# Altium footprint library ESP8266.PcbLib: 13 footprints
Each footprint in its own frame and in the unit in brackets; x right, y up, seen from the top. Pads: shape width x height; smd on the part's side, far side on the other; paste and mask are expansions set on the pad; w line width, h text height; cw(c..) or ccw(c..) is an arc to the next point about the centre after c.
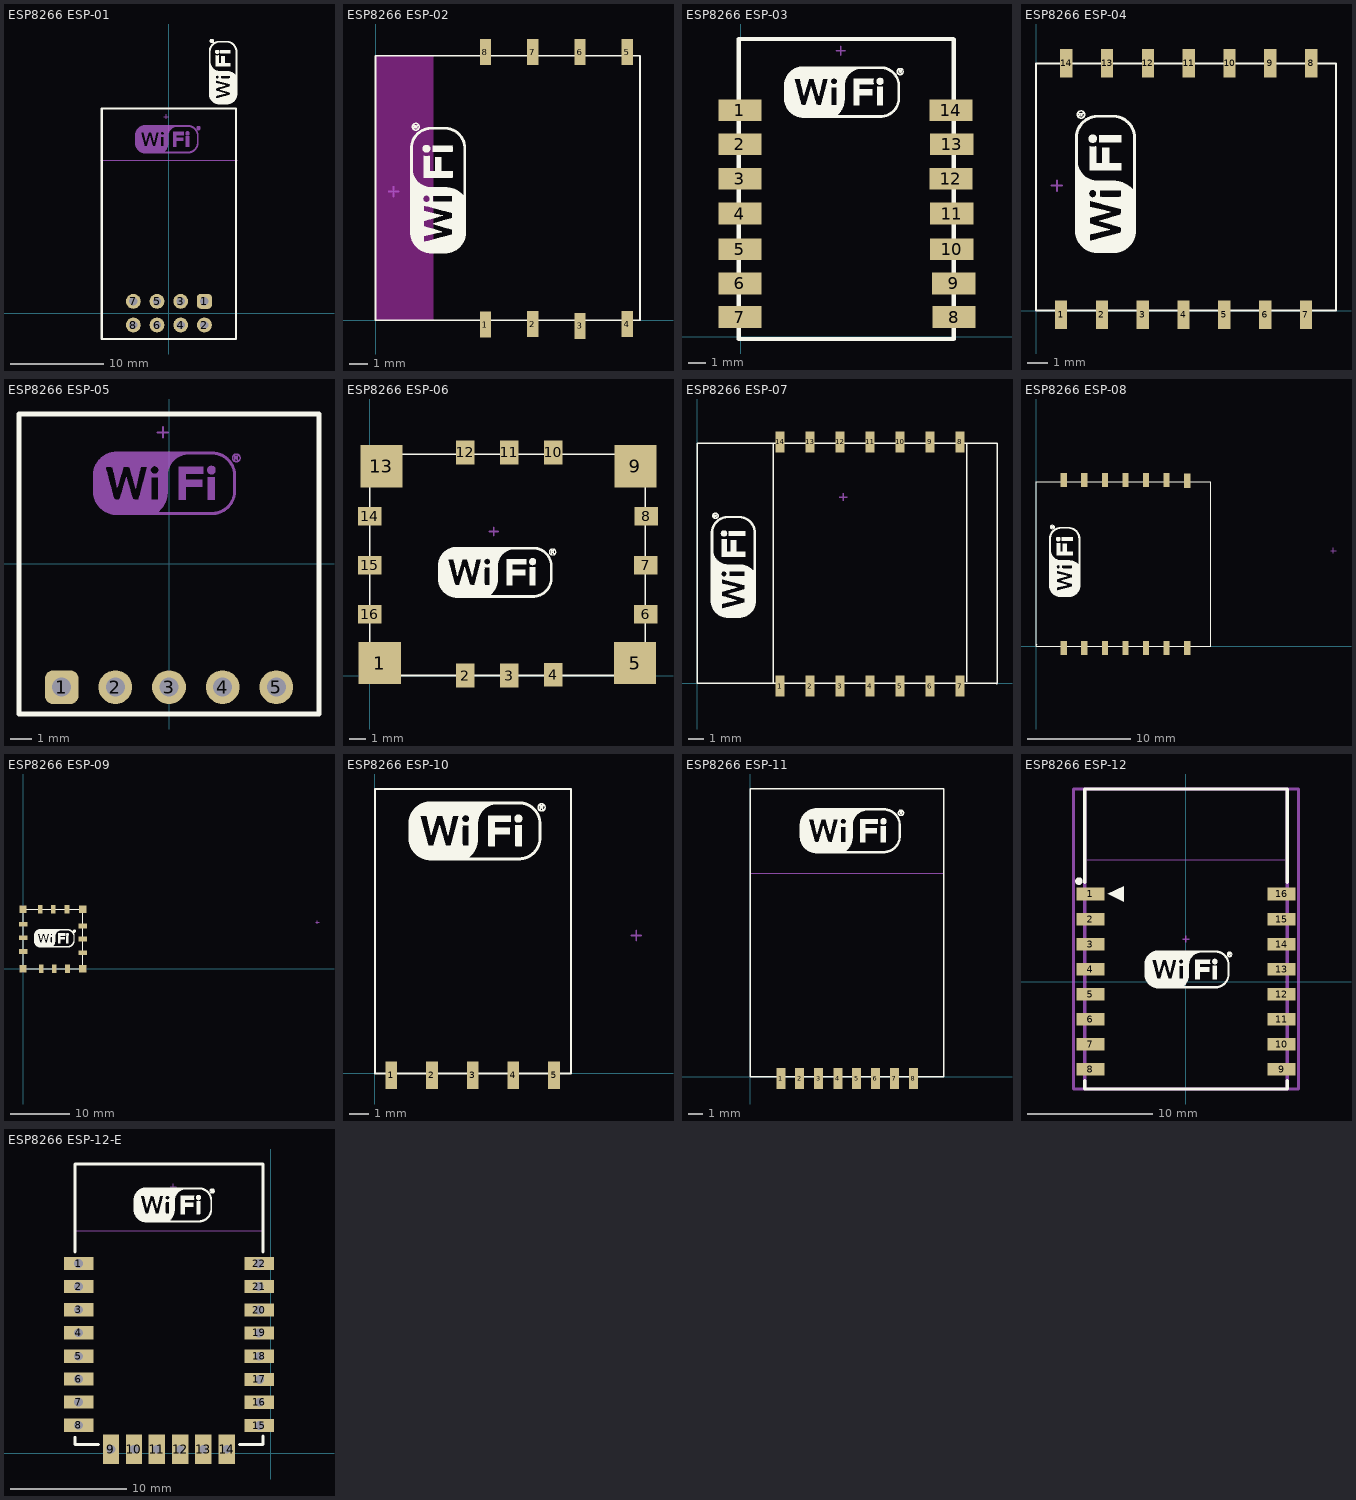
[diagram p0: the footprints below, top view; thin cyan lines are the x and y axes]

## ESP8266 ESP-01 [mm] "ESP8266 ESP-01"
pads (8):
  rrect50% 1.6x1.6 hole 0.9: 1(3.81,1.27)
  round 1.6 hole 0.9: 2(3.81,-1.27) 3(1.27,1.27) 4(1.27,-1.27) 5(-1.27,1.27) 6(-1.27,-1.27) 7(-3.81,1.27) 8(-3.81,-1.27)
Top Overlay:
  drawing of 1264 lines, arcs and shapes, not listed
Mechanical 1:
  drawing of 1260 lines, arcs and shapes, not listed
Mechanical 13:
  lines w0.051: -7.289,16.395 7.315,16.395
  text "CUTOUT POLYGON" at -7.035,21.034 h0.25
  text "ANTENNA AREA" at -7.035,21.542 h0.25
Mechanical 15:
  lines w0.1: -0.559,21.067 -0.051,21.067 ; -0.305,20.813 -0.305,21.321
3D body "zl262-8d_p2-54_l10-66_w5_h8-5.step": height 8.5, standoff -3, extent -5.33,-2.5 5.33,2.5
3D body "User Library-Wi07C.STEP": height -1.2, standoff -12.88, extent -7.275,-2.781 7.225,22.019

## ESP8266 ESP-02 [mm] "ESP8266 ESP-02"
pads (8):
  rect 0.6x1.4 smd: 1(5.893,-0.229) 2(8.433,-0.203) 3(10.973,-0.305) 4(13.513,-0.203) 5(13.513,14.402) 6(10.973,14.402) 7(8.433,14.402) 8(5.893,14.402)
Top Layer keep-out:
  region: 0,14.2 0.027,14.173 3.099,14.173 3.099,0.025 3.073,0 0,0
Top Overlay:
  drawing of 1264 lines, arcs and shapes, not listed
  text ".Designator" at 0,-0.965 h1
Mechanical 15:
  lines w0.1: 0.713,6.909 1.221,6.909 ; 0.967,6.655 0.967,7.163
3D body: height 0.5, standoff 0, extent 0,0 14.199,14.199
3D body: height 1, standoff 0.5, extent 4.826,3.454 9.144,7.95
3D body: height 1, standoff 0.5, extent 10.63,4.635 13.094,6.896

## ESP8266 ESP-03 [mil] "ESP8266 ESP-03"
pads (14):
  rect 100x50 smd: 1(-2,522) 2(-2,443.27) 3(-2,364) 4(-2,284) 5(-2,202) 6(-2,123) 7(-2,45.57) 8(491,45.57) 9(490,123) 10(486,202) 11(486,284) 12(484,364) 13(486,443.27) 14(484,522)
Top Overlay:
  drawing of 1265 lines, arcs and shapes, not listed
  text ".Designator" at -6,-48 h39.37
Mechanical 15:
  lines w3.94: 220,658.92 240,658.92 ; 230,648.92 230,668.92
3D body "User Library-ESP-03.STEP": height 134.34, standoff -1.09, extent -0.97,1 483.28,682.1

## ESP8266 ESP-04 [mm] "ESP8266 ESP-04"
pads (14):
  rect 0.6x1.4 smd: 1(1.229,-0.203) 2(3.229,-0.203) 3(5.229,-0.203) 4(7.229,-0.203) 5(9.229,-0.203) 6(11.229,-0.203) 7(13.229,-0.203) 8(13.483,12.116) 9(11.483,12.116) 10(9.483,12.116) 11(7.483,12.116) 12(5.483,12.116) 13(3.483,12.116) 14(1.483,12.116)
Top Overlay:
  drawing of 1264 lines, arcs and shapes, not listed
  text ".Designator" at -0.076,-1.956 h1
Mechanical 15:
  lines w0.1: 0.764,6.121 1.272,6.121 ; 1.018,5.867 1.018,6.375
3D body: height 0.5, standoff 0, extent 0,0 14.681,12.09
3D body: height 1, standoff 0.5, extent 3.683,1.956 8.001,6.452
3D body: height 1, standoff 0.5, extent 9.271,1.981 11.735,4.242

## ESP8266 ESP-05 [mm] "ESP8266 ESP-05"
pads (5):
  rrect50% 1.6x1.6 hole 0.9: 1(-5.08,-5.83)
  round 1.6 hole 0.9: 2(-2.54,-5.83) 3(0,-5.83) 4(2.54,-5.83) 5(5.08,-5.83)
Top Overlay:
  lines w0.254: -7.1,-7.1 7.1,-7.1 7.1,7.1 -7.1,7.1 -7.1,-7.1
Mechanical 1:
  drawing of 1260 lines, arcs and shapes, not listed
Mechanical 15:
  lines w0.1: -0.547,6.233 -0.039,6.233 ; -0.293,5.979 -0.293,6.487
3D body: height 0.5, standoff 0, extent -7.1,-7.075 7.099,7.099
3D body: height 1, standoff 0.5, extent -4.433,-3.62 -0.115,0.876
3D body: height 1, standoff 0.5, extent 1.155,-3.595 3.619,-1.334

## ESP8266 ESP-06 [mm] "ESP8266 ESP-06"
pads (16):
  rect 2.5x2.5 smd: 1(0.584,0.737) 5(15.697,0.737) 9(15.723,12.395) 13(0.686,12.395)
  rect 1.1x1.4 smd: 2(5.648,0) 3(8.248,0) 4(10.848,0.051) 10(10.848,13.208) 11(8.248,13.208) 12(5.648,13.208)
  rect 1.4x1.1 smd: 6(16.332,3.642) 7(16.332,6.542) 8(16.358,9.442) 14(0,9.442) 15(0,6.542) 16(0,3.642)
Top Overlay:
  drawing of 1264 lines, arcs and shapes, not listed
  text ".Designator" at -0.686,-1.651 h1
Mechanical 15:
  lines w0.1: 7.087,8.532 7.595,8.532 ; 7.341,8.278 7.341,8.786
3D body: height 0.5, standoff 0, extent 0,0 16.281,13.081
3D body: height 1, standoff 0.5, extent 3.734,3.215 8.052,7.711
3D body: height 1, standoff 0.5, extent 9.322,3.241 11.786,5.501

## ESP8266 ESP-07 [mm] "ESP8266 ESP-07"
pads (14):
  rect 0.6x1.4 smd: 1(5.533,-0.178) 2(7.533,-0.178) 3(9.533,-0.178) 4(11.533,-0.178) 5(13.533,-0.178) 6(15.533,-0.178) 7(17.533,-0.178) 8(17.533,16.104) 9(15.533,16.104) 10(13.533,16.104) 11(11.533,16.104) 12(9.533,16.104) 13(7.533,16.104) 14(5.533,16.104)
Top Overlay:
  drawing of 1267 lines, arcs and shapes, not listed
  text ".Designator" at 0,-1.702 h1
Mechanical 15:
  lines w0.1: 9.5,12.419 10.008,12.419 ; 9.754,12.165 9.754,12.673
3D body: height 1, standoff 0.5, extent 13.36,2.591 15.824,4.851
3D body: height 1, standoff 0.5, extent 7.772,2.565 12.09,7.061
3D body: height 0.5, standoff 0, extent 0,0 20.041,16.002

## ESP8266 ESP-08 [mm] "ESP8266 ESP-08"
pads (14):
  rect 0.6x1.4 smd: 1(2.695,-0.178) 2(4.695,-0.178) 3(6.695,-0.178) 4(8.695,-0.178) 5(10.695,-0.178) 6(12.695,-0.178) 7(14.695,-0.178) 8(14.695,16.078) 9(12.695,16.154) 10(10.695,16.154) 11(8.695,16.154) 12(6.695,16.154) 13(4.695,16.154) 14(2.695,16.154)
Top Overlay:
  drawing of 1265 lines, arcs and shapes, not listed
  text ".Designator" at -0.229,-1.499 h1
Mechanical 15:
  lines w0.1: 28.651,9.294 29.159,9.294 ; 28.905,9.04 28.905,9.548
3D body: height 0.5, standoff 0, extent 0,0 17.018,16.002
3D body: height 1, standoff 0.5, extent 4.75,2.565 9.068,7.061
3D body: height 1, standoff 0.5, extent 10.338,2.591 12.802,4.851

## ESP8266 ESP-09 [mm] "ESP8266 ESP-09"
pads (16):
  rect 1.2x1.2 smd: 1(0,0) 5(10,0) 9(10,10) 13(0,10)
  rect 0.8x1.4 smd: 2(3.023,0) 3(5.232,0) 4(7.442,0) 10(7.366,10) 11(5.055,10) 12(2.87,10)
  rect 1.4x0.8 smd: 6(10,2.692) 7(10,4.978) 8(10,7.188) 14(0,7.493) 15(0,5.194) 16(0,2.896)
Top Overlay:
  drawing of 1264 lines, arcs and shapes, not listed
  text ".Designator" at -0.635,-1.651 h1
Mechanical 15:
  lines w0.1: 49.2,7.796 49.708,7.796 ; 49.454,7.542 49.454,8.05
3D body: height 0.5, standoff 0, extent 0,0 10.008,10.008
3D body: height 1, standoff 0.5, extent 2.565,2.769 7.061,7.087

## ESP8266 ESP-10 [mm] "ESP8266 ESP-10"
pads (5):
  rect 0.6x1.4 smd: 1(0.838,-0.102) 2(2.915,-0.102) 3(4.991,-0.102) 4(7.068,-0.102) 5(9.144,-0.102)
Top Overlay:
  drawing of 1264 lines, arcs and shapes, not listed
  text ".Designator" at 0,-1.803 h1
Mechanical 15:
  lines w0.1: 13.081,7.034 13.589,7.034 ; 13.335,6.78 13.335,7.288
3D body: height 1, standoff 0.5, extent 0.914,1.676 3.175,4.14
3D body: height 1, standoff 0.5, extent 0.889,5.41 5.385,9.728
3D body: height 0.5, standoff 0, extent 0,0 10.008,14.478

## ESP8266 ESP-11 [mm] "ESP8266 ESP-11"
pads (8):
  rect 0.6x1.4 smd: 1(2.057,-0.127) 2(3.327,-0.127) 3(4.597,-0.127) 4(5.893,-0.127) 5(7.137,-0.127) 6(8.407,-0.127) 7(9.677,-0.127) 8(10.947,-0.127)
Top Overlay:
  drawing of 1264 lines, arcs and shapes, not listed
  text ".Designator" at 0,-1.93 h1
Mechanical 13:
  lines w0.051: 0.026,13.639 13,13.64
  text "CUTOUT POLYGON" at 0.28,18.278 h0.25
  text "ANTENNA AREA" at 0.28,18.786 h0.25
Mechanical 15:
  lines w0.1: 6.35,17.346 6.858,17.346 ; 6.604,17.092 6.604,17.6
3D body: height 0.5, standoff 0, extent 0,0 13.005,19.304
3D body: height 1, standoff 0.5, extent 2.718,7.671 7.214,11.989
3D body: height 1, standoff 0.5, extent 2.743,3.937 5.004,6.401

## ESP8266 ESP-12 [mm] "ESP8266 ESP-12"
height 3.2
pads (16):
  rect 2.25x1 smd: 1(-7.625,7) 2(-7.625,5) 3(-7.625,3) 4(-7.625,1) 5(-7.625,-1) 6(-7.625,-3) 7(-7.625,-5) 8(-7.625,-7) 9(7.625,-7) 10(7.625,-5) 11(7.625,-3) 12(7.625,-1) 13(7.625,1) 14(7.625,3) 15(7.625,5) 16(7.625,7)
Top Overlay:
  drawing of 1268 lines, arcs and shapes, not listed
  text ".Designator" at -8.433,-9.398 h1
Mechanical 13:
  lines w0.051: -8.127,9.727 8.129,9.727 8.129,15.382 -8.127,15.382 -8.127,9.727
  lines w0.254: -8.084,-8.568 -8.084,15.371 8.084,15.371 8.084,-8.568 -8.084,-8.568
  text "ANTENNA AREA" at -7.873,14.874 h0.25
  text "CUTOUT POLYGON" at -7.873,14.366 h0.25
Mechanical 15:
  lines w0.1: -0.254,3.402 0.254,3.402 ; 0,3.148 0,3.656
  lines w0.254: -8.975,-8.568 8.975,-8.568 8.975,15.371 -8.975,15.371 -8.975,-8.568
3D body "ESP_12_ENew.STEP": height 3.82, standoff -0.05, extent -7.859,-8.522 8.156,15.509

## ESP8266 ESP-12-E [mil] "ESP8266 ESP-12-E"
pads (22):
  rect 100x45 hole 30: 1(-653,646) 2(-653,568) 3(-653,489) 4(-653,411) 5(-653,331) 6(-653,253) 7(-653,175) 8(-653,96) 15(-38,95) 16(-38,174) 17(-38,252) 18(-39,331) 19(-39,410) 20(-39,488) 21(-39,568) 22(-39,646)
  rect 55x100 hole 30: 9(-543,14) 10(-465,14) 11(-387,14) 12(-307,14) 13(-229,14) 14(-149,14)
Top Overlay:
  drawing of 1267 lines, arcs and shapes, not listed
  text ".Designator" at -679,-84 h39.37
Mechanical 13:
  lines w2: -662.96,757.97 -22.96,757.97
  text "CUTOUT POLYGON" at -652.96,940.59 h10
  text "ANTENNA AREA" at -652.96,960.59 h10
Mechanical 15:
  lines w3.94: -341,907.92 -321,907.92 ; -331,897.92 -331,917.92
3D body "User Library-ESP_12_E.STEP": height 85.7, standoff -1.17, extent -661,36.56 -31.08,981.44